# Altium footprint library EEE-FK0J471P.PcbLib: 3 footprints
Each footprint in its own frame and in the unit in brackets; x right, y up, seen from the top. Pads: shape width x height; smd on the part's side, far side on the other; paste and mask are expansions set on the pad; w line width, h text height; cw(c..) or ccw(c..) is an arc to the next point about the centre after c.
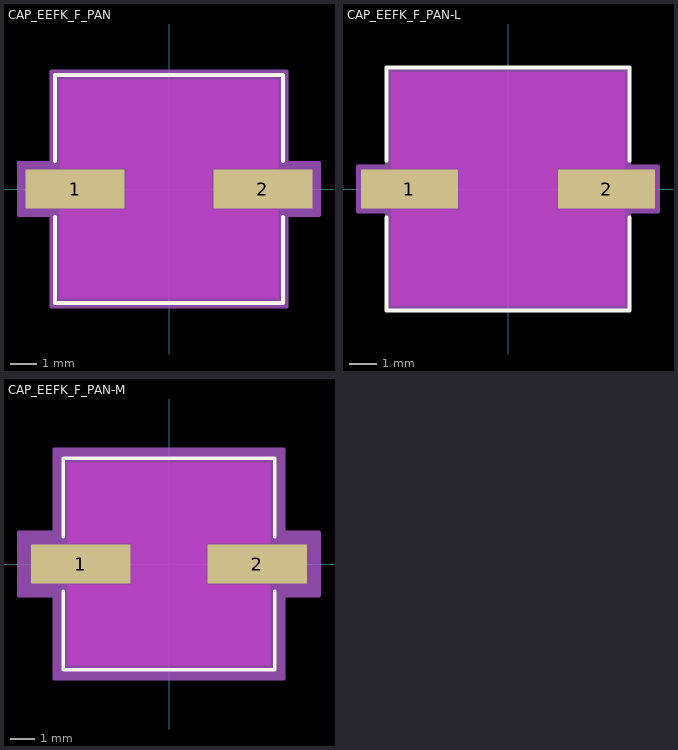
[diagram p0: the footprints below, top view; thin cyan lines are the x and y axes]

## CAP_EEFK_F_PAN [mil]
pads (2):
  rect 150x59 smd paste+0 mask+0: 1(-142,0) 2(142,0)
Top Layer keep-out:
  region: -165.5,-165.5 -165.5,-31.5 165.5,-31.5 165.5,-165.5
  region: -165.5,31.5 -165.5,165.5 165.5,165.5 165.5,31.5
  region: -65,-31.5 -65,31.5 65,31.5 65,-31.5
Top Overlay:
  lines w6: -172.5,-42.6 -172.5,-172.5 172.5,-172.5 172.5,-42.6 ; -172.5,42.6 -172.5,172.5 172.5,172.5 172.5,42.6
Keep-Out Layer:
  region: -65,-31.5 -65,31.5 65,31.5 65,-31.5
Mechanical 13:
  lines w1: -167.5,-83.75 -83.75,-167.5 ; -167.5,83.75 -83.75,167.5 ; -167.5,-167.5 -167.5,167.5 167.5,167.5 167.5,-167.5 -167.5,-167.5
Mechanical 15:
  region: -177.5,-39.5 -227,-39.5 -227,39.5 -177.5,39.5 -177.5,177.5 177.5,177.5 177.5,39.5 227,39.5 227,-39.5 177.5,-39.5 177.5,-177.5 -177.5,-177.5
  lines w6: -227,-39.5 -177.5,-39.5 -177.5,-177.5 177.5,-177.5 177.5,-39.5 227,-39.5 227,39.5 177.5,39.5 177.5,177.5 -177.5,177.5 -177.5,39.5 -227,39.5 -227,-39.5
3D body "CAP_EEFK_F_PAN.step": height 415.12, standoff 0, extent -197.01,-167.48 197.01,167.48

## CAP_EEFK_F_PAN-L [mil]
pads (2):
  rect 138x55 smd paste+0 mask+0: 1(-140,0) 2(140,0)
Top Layer keep-out:
  region: -69,-29.5 -69,29.5 69,29.5 69,-29.5
  region: -165.5,29.5 -165.5,165.5 165.5,165.5 165.5,29.5
  region: -165.5,-165.5 -165.5,-29.5 165.5,-29.5 165.5,-165.5
Top Overlay:
  lines w6: -172.5,-40.6 -172.5,-172.5 172.5,-172.5 172.5,-40.6 ; -172.5,40.6 -172.5,172.5 172.5,172.5 172.5,40.6
  text ".Designator" at -137.5,-25 h50
Keep-Out Layer:
  region: -69,-29.5 -69,29.5 69,29.5 69,-29.5
Mechanical 13:
  lines w1: -167.5,-83.75 -83.75,-167.5 ; -167.5,83.75 -83.75,167.5 ; -167.5,-167.5 167.5,-167.5 167.5,167.5 -167.5,167.5 -167.5,-167.5
  text ".Designator" at -137.5,-25 h50
Mechanical 15:
  region: -171.5,-31.5 -213,-31.5 -213,31.5 -171.5,31.5 -171.5,171.5 171.5,171.5 171.5,31.5 213,31.5 213,-31.5 171.5,-31.5 171.5,-171.5 -171.5,-171.5
  lines w6: -213,-31.5 -213,31.5 -171.5,31.5 -171.5,171.5 171.5,171.5 171.5,31.5 213,31.5 213,-31.5 171.5,-31.5 171.5,-171.5 -171.5,-171.5 -171.5,-31.5 -213,-31.5
3D body "CAP_EEFK_F_PAN.step": height 415.12, standoff 0, extent -197.01,-167.48 197.01,167.48

## CAP_EEFK_F_PAN-M [mil]
pads (2):
  rect 162x63 smd paste+0 mask+0: 1(-144,0) 2(144,0)
Top Layer keep-out:
  region: -61,-33.5 -61,33.5 61,33.5 61,-33.5
  region: -165.5,33.5 -165.5,165.5 165.5,165.5 165.5,33.5
  region: -165.5,-165.5 -165.5,-33.5 165.5,-33.5 165.5,-165.5
Top Overlay:
  lines w6: -172.5,-44.6 -172.5,-172.5 172.5,-172.5 172.5,-44.6 ; -172.5,44.6 -172.5,172.5 172.5,172.5 172.5,44.6
  text ".Designator" at -137.5,-25 h50
Keep-Out Layer:
  region: -61,-33.5 -61,33.5 61,33.5 61,-33.5
Mechanical 13:
  lines w1: -167.5,-83.75 -83.75,-167.5 ; -167.5,83.75 -83.75,167.5 ; -167.5,-167.5 167.5,-167.5 167.5,167.5 -167.5,167.5 -167.5,-167.5
  text ".Designator" at -137.5,-25 h50
Mechanical 15:
  region: -187.5,-51.5 -245,-51.5 -245,51.5 -187.5,51.5 -187.5,187.5 187.5,187.5 187.5,51.5 245,51.5 245,-51.5 187.5,-51.5 187.5,-187.5 -187.5,-187.5
  lines w6: -245,-51.5 -245,51.5 -187.5,51.5 -187.5,187.5 187.5,187.5 187.5,51.5 245,51.5 245,-51.5 187.5,-51.5 187.5,-187.5 -187.5,-187.5 -187.5,-51.5 -245,-51.5
3D body "CAP_EEFK_F_PAN.step": height 415.12, standoff 0, extent -197.01,-167.48 197.01,167.48